# Altium footprint library SamacSys.PcbLib: 70 footprints (part 5 of 5)
Each footprint in its own frame and in the unit in brackets; x right, y up, seen from the top. Pads: shape width x height; smd on the part's side, far side on the other; paste and mask are expansions set on the pad; w line width, h text height; cw(c..) or ccw(c..) is an arc to the next point about the centre after c.
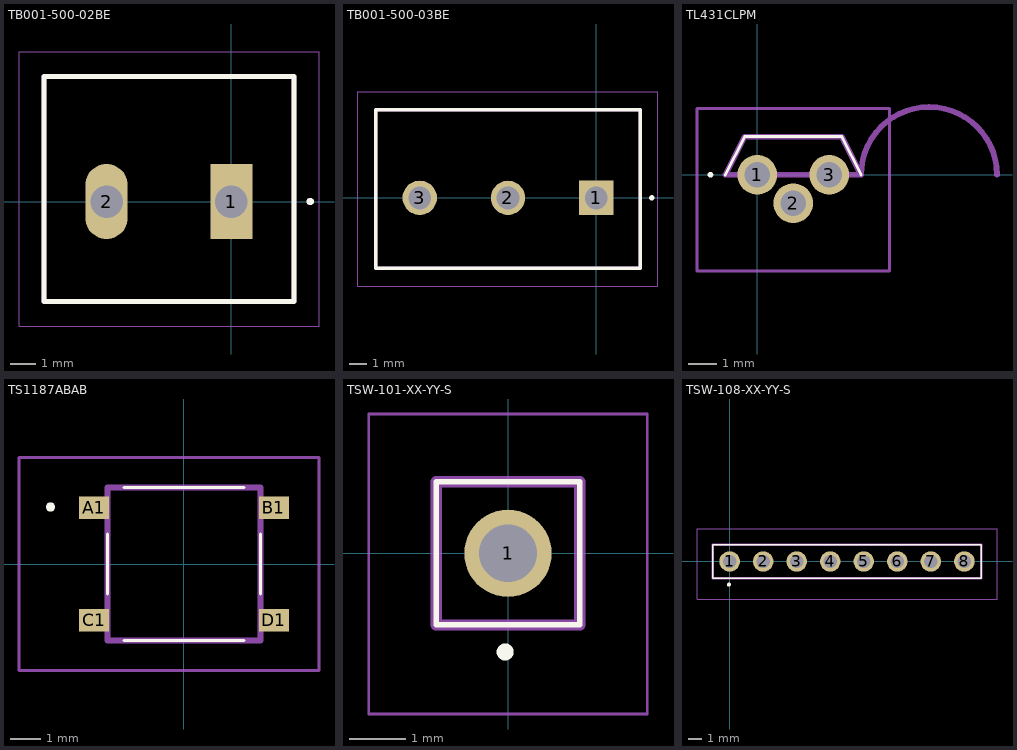
[diagram p4: the footprints below, top view; thin cyan lines are the x and y axes]

## TB001-500-02BE [mm]
pads (2):
  rect 1.7x3 hole 1.3: 1(0,0)
  oval 1.7x3 hole 1.3: 2(-5,0)
Top Overlay:
  circle w0.2: c3.15,0 r0.05
  lines w0.2: -7.5,-4 -7.5,5 2.5,5 2.5,-4 -7.5,-4
Mechanical 13:
  lines w0.2: -7.5,-4 -7.5,5 2.5,5 2.5,-4 -7.5,-4
Mechanical 15:
  lines w0.05: -8.5,-5 -8.5,6 3.5,6 3.5,-5 -8.5,-5
3D body "TB001-500-02BE.stp": height 12.5, standoff -4.4, extent -8.05,-4 2.45,5

## TB001-500-03BE [mm]
pads (3):
  rect 1.95x1.95 hole 1.3: 1(0,0)
  round 1.95 hole 1.3: 2(-5,0) 3(-10,0)
Top Overlay:
  circle w0.2: c3.15,0 r0.05
  lines w0.2: -12.5,-4 -12.5,5 2.5,5 2.5,-4 -12.5,-4
Mechanical 13:
  lines w0.2: -12.5,-4 -12.5,5 2.5,5 2.5,-4 -12.5,-4
Mechanical 15:
  lines w0.05: -13.5,-5 -13.5,6 3.5,6 3.5,-5 -13.5,-5
3D body "TB001-500-03BE.stp": height 12.5, standoff -4.4, extent -12.94,-4 2.56,5

## TL431CLPM [mm]
pads (3):
  round 1.4 hole 0.9: 1(0,0) 2(1.27,-1) 3(2.54,0)
Top Overlay:
  lines w0.1: -1.13,0 -0.445,1.35 2.985,1.35 3.67,0 ; -1.707,0.005 cw(c-1.656,0.005) -1.605,0.005 cw(c-1.656,0.005) -1.707,0.005
Mechanical 13:
  lines w0.2: 8.47,0 ccw(c6.07,0) 3.67,0 ; -0.445,1.35 2.985,1.35 ; -0.445,1.35 2.985,1.35 ; -0.445,1.35 -1.13,0 3.67,0 ; 2.985,1.35 3.67,0
Mechanical 15:
  lines w0.1: -2.13,-3.4 4.67,-3.4 4.67,2.35 -2.13,2.35 -2.13,-3.4
3D body "LM234Z-3_NOPB.stp": height 10.08, standoff -7.44, extent -3.682,-2.292 1.142,1.39

## TS1187ABAB [mm]
pads (4):
  rect 1x0.75 smd: A1(-3,1.875) B1(3,1.875) C1(-3,-1.875) D1(3,-1.875)
Top Overlay:
  lines w0.1: -2.55,-1 -2.55,1 ; -2,-2.55 2,-2.55 ; -2,2.55 2,2.55 ; 2.55,-1 2.55,1
  lines w0.2: -4.5,1.9 ccw(c-4.45,1.9) -4.4,1.9 ; -4.5,1.9 cw(c-4.45,1.9) -4.4,1.9 ; -4.5,1.9 ccw(c-4.45,1.9) -4.4,1.9
Mechanical 13:
  lines w0.2: -2.55,-2.55 -2.55,2.55 2.55,2.55 2.55,-2.55 -2.55,-2.55
Mechanical 15:
  lines w0.1: -5.5,-3.55 -5.5,3.55 4.5,3.55 4.5,-3.55 -5.5,-3.55
3D body "TS-1187A-B-A-B.stp": height 1.5, standoff 0, extent -3.2,-2.55 3.3,2.55

## TSW-101-XX-YY-S [mm]
pads (1):
  round 1.55 hole 1.02: 1(0,0)
Top Overlay:
  circle w0.2: c-0.05,-1.75 r0.05
  lines w0.1: -1.27,-1.27 -1.27,1.27 1.27,1.27 1.27,-1.27 -1.27,-1.27
Mechanical 13:
  lines w0.2: -1.27,-1.27 -1.27,1.27 1.27,1.27 1.27,-1.27 -1.27,-1.27
Mechanical 15:
  lines w0.05: -2.47,-2.85 -2.47,2.47 2.47,2.47 2.47,-2.85 -2.47,-2.85
3D body "TSW-101-07-G-S.stp": height 10.92, standoff 0, extent -1.27,-1.46 1.27,1.08

## TSW-108-XX-YY-S [mm]
pads (8):
  round 1.55 hole 1.02: 1(0,0) 2(2.54,0) 3(5.08,0) 4(7.62,0) 5(10.16,0) 6(12.7,0) 7(15.24,0) 8(17.78,0)
Top Overlay:
  circle w0.2: c-0.05,-1.75 r0.05
  lines w0.1: -1.27,-1.27 -1.27,1.27 19.05,1.27 19.05,-1.27 -1.27,-1.27
Mechanical 13:
  lines w0.2: -1.27,-1.27 -1.27,1.27 19.05,1.27 19.05,-1.27 -1.27,-1.27
Mechanical 15:
  lines w0.05: -2.47,-2.85 -2.47,2.47 20.25,2.47 20.25,-2.85 -2.47,-2.85
3D body "TSW-108-07-G-S.stp": height 8.32, standoff -2.6, extent -1.377,-1.3 19.07,1.24